# Altium schematic symbol library Fixture-Lib.SchLib: 2 symbols
Pins are listed as number, name and electrical type; pins without a type are passive.

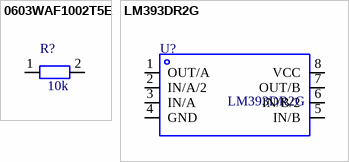
[diagram p0: symbols 0603WAF1002T5E to LM393DR2G]

## 0603WAF1002T5E
designator R?, comment 10k
10k Light sensor load resistor LCSC C25804; MPN: 0603WAF1002T5E; Manufacturer: UNI-ROYAL(Uniroyal Elec); LCSC: C25804
footprint R0603
pins: 1, 2

## LM393DR2G
designator U?
LCSC C7955; Manufacturer: onsemi; MPN: LM393DR2G; LCSC: C7955
footprint SOIC-8_L5.0-W4.0-P1.27-LS6.0-BL
pins: 1 OUT/A, 2 IN/A/2, 3 IN/A, 4 GND (power), 5 IN/B, 6 IN/B/2, 7 OUT/B, 8 VCC (power)